# Altium footprint library V3_Pcblib.PcbLib: 26 footprints (part 2 of 2)
Each footprint in its own frame and in the unit in brackets; x right, y up, seen from the top. Pads: shape width x height; smd on the part's side, far side on the other; paste and mask are expansions set on the pad; w line width, h text height; cw(c..) or ccw(c..) is an arc to the next point about the centre after c.
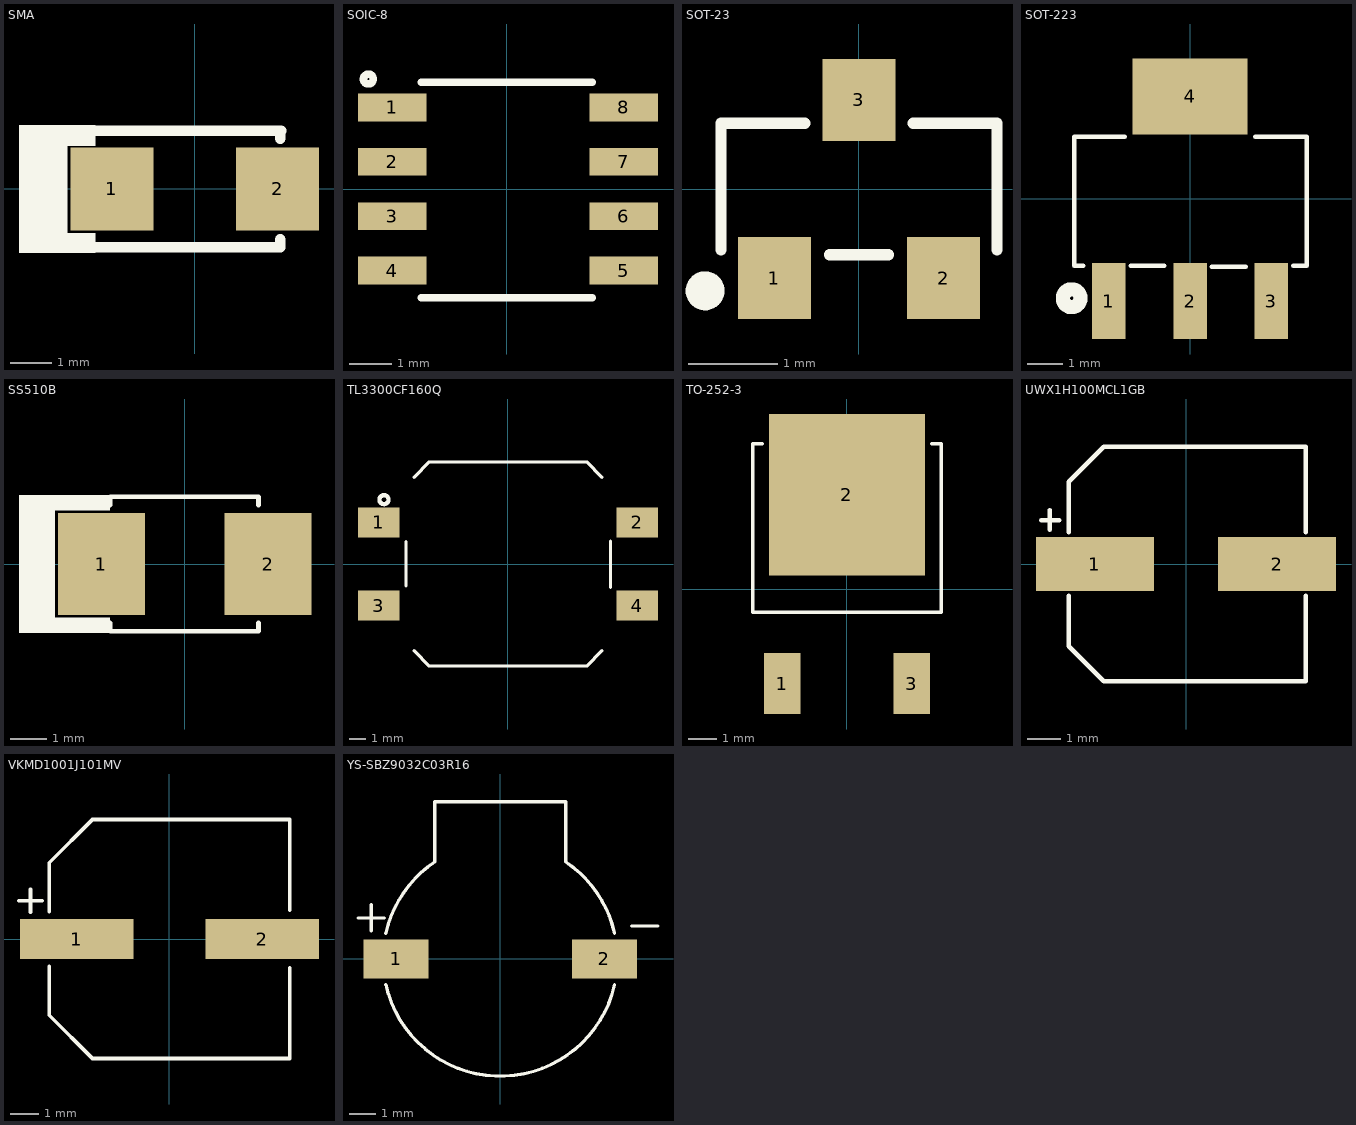
[diagram p1: the footprints below, top view; thin cyan lines are the x and y axes]

## SMA [mm]
pads (2):
  rect 2x2 smd: 1(-2,0) 2(2,0)
Top Overlay:
  rectangle: -4.242,-1.549 -3.075,1.549
  rectangle: -3.097,1.041 -2.393,1.549
  rectangle: -3.097,-1.549 -2.393,-1.067
  lines w0.254: -2.393,-1.408 2.057,-1.408 ; -2.393,1.408 2.083,1.408 ; 2.061,-1.408 2.061,-1.219 ; 2.061,1.219 2.061,1.408
3D body "User Library-DO-214AC SMA.step": height 2.4, standoff 0, extent -2.6,-1.3 2.6,1.3

## SOIC-8 [mm]
height 1.778
pads (8):
  rect 1.6x0.65 smd: 1(-2.667,1.905) 2(-2.667,0.635) 3(-2.667,-0.635) 4(-2.667,-1.905) 5(2.733,-1.905) 6(2.733,-0.635) 7(2.733,0.635) 8(2.733,1.905)
Top Overlay:
  circle w0.178: c-3.226,2.565 r0.114
  lines w0.178: -1.994,-2.54 1.994,-2.54 ; -1.994,2.489 1.994,2.489
3D body "SO-8N.STEP": height 1.61, standoff -0.01, extent -3,-2.46 3,2.46

## SOT-23 [mm] "TRANS NPN 40V 0.6A SOT23"
pads (3):
  rect 0.82x0.92 smd: 1(-0.95,-1) 2(0.95,-1) 3(0,1)
Top Overlay:
  circle w0.254: c-1.727,-1.143 r0.092
  lines w0.127: -1.549,-0.686 -1.549,0.737 -0.61,0.737 ; -0.33,-0.737 0.33,-0.737 ; 0.61,0.737 1.549,0.737 1.549,-0.686
3D body "CircuitWorks-SOT-23.step": height 1.1, standoff 0, extent -1.5,-1.25 1.5,1.25

## SOT-223 [mm]
pads (4):
  rect 0.95x2.15 smd: 1(-2.3,-2.9) 2(0,-2.9) 3(2.3,-2.9)
  rect 3.25x2.15 smd: 4(0,2.9)
Top Overlay:
  circle w0.4: c-3.353,-2.819 r0.251
  lines w0.127: -3.023,-1.905 -3.277,-1.905 -3.277,1.753 -1.854,1.753 ; -1.676,-1.905 -0.737,-1.905 ; 0.61,-1.93 1.575,-1.93 ; 1.854,1.753 3.302,1.753 3.302,-1.905 2.921,-1.905
3D body "CircuitWorks-SOT-223.STEP": height 1.65, standoff -0.03, extent -3.275,-3.505 3.225,3.455

## SS510B [mm]
pads (2):
  rect 2.4x2.8 smd: 1(-2.3,0) 2(2.3,0)
Top Overlay:
  rectangle: -3.658,-1.905 -2.057,-1.473
  rectangle: -4.572,-1.905 -3.581,1.905
  rectangle: -3.658,1.473 -2.057,1.905
  lines w0.127: -2.057,-1.626 -2.057,-1.854 2.032,-1.854 2.032,-1.626 ; -2.057,1.626 -2.057,1.854 2.032,1.854 2.032,1.626
3D body "User Library-DO-214AA SMB.step": height 2.3, standoff 0, extent -2.7,-1.8 2.7,1.8

## TL3300CF160Q [mm] "SWITCH TACTILE SPST-NO 0.05A 12V"
height 8.5
pads (4):
  rect 2.5x1.8 smd: 1(-7.75,2.5) 2(7.75,2.5) 3(-7.75,-2.5) 4(7.75,-2.5)
Top Overlay:
  circle w0.254: c-7.442,3.861 r0.27
  lines w0.2: -6.121,-1.295 -6.121,1.342 ; -5.639,-5.207 -4.724,-6.121 4.724,-6.121 5.639,-5.207 ; -5.639,5.207 -4.724,6.121 4.724,6.121 5.639,5.207 ; 6.147,-1.397 6.147,1.368
3D body "TL3300CFxxxQ (1).stp": height 8.77, standoff -0.03, extent -7.5,-5.98 7.5,6.02

## TO-252-3 [mm]
pads (3):
  rect 1.3x2.15 smd: 1(-2.285,-3.333) 3(2.285,-3.333)
  rect 5.5x5.7 smd: 2(0,3.333)
Top Overlay:
  lines w0.127: -2.997,5.131 -3.327,5.131 -3.327,-0.813 3.327,-0.813 3.327,5.131 2.997,5.131
3D body "LM78M05CDT.STEP": height 2.67, standoff -0.05, extent -3.27,-3.786 3.27,6.124

## UWX1H100MCL1GB [mm]
pads (2):
  rect 3.5x1.6 smd: 1(-2.7,0) 2(2.7,0)
Top Overlay:
  lines w0.127: -4.293,1.295 -3.759,1.295 ; -4.039,1.016 -4.039,1.6 ; -3.48,-0.94 -3.48,-2.438 -2.438,-3.48 3.556,-3.48 3.556,-0.94 ; -3.48,0.94 -3.48,2.438 -2.438,3.48 3.556,3.48 3.556,0.94
3D body "PCAP_6_3x5_4-ELECT_NCA.step": height 5.57, standoff 0, extent -3.696,-3.404 3.696,3.404

## VKMD1001J101MV [mm] "63V 10mm 8mm 100uF ±20%"
pads (2):
  rect 4x1.4 smd: 1(-3.275,0) 2(3.275,0)
Top Overlay:
  lines w0.127: -5.309,1.346 -4.496,1.346 ; -4.902,0.94 -4.902,1.753 ; -4.242,-0.965 -4.242,-2.692 -2.718,-4.216 4.242,-4.216 4.242,-1.016 ; -4.242,0.965 -4.242,2.692 -2.718,4.216 4.242,4.216 4.242,1.016
3D body "vkmd1001j101mv_c487384.stp": height 9.95, standoff -0.05, extent -4.65,-4.15 4.65,4.15

## YS-SBZ9032C03R16 [mm] "NO 2700Hz 85dB @ 3V, 10cm 3V F9mm SMD,9x3.2mm Buzzers RoHS"
pads (2):
  rect 2.5x1.5 smd: 1(-4,0) 2(4,0)
Top Overlay:
  lines w0.127: -5.461,1.575 -4.445,1.575 ; -4.953,1.075 -4.953,2.091 ; -4.391,-0.984 ccw(c0,0) 4.389,-0.992 ; -4.391,0.984 cw(c0,0) -2.51,3.735 -2.51,6.035 2.51,6.035 2.51,3.735 cw(c0,0) 4.391,0.984 ; 5.042,1.27 6.058,1.27